# EAGLE library part DISP_7SEG (library dp_devices.v6)
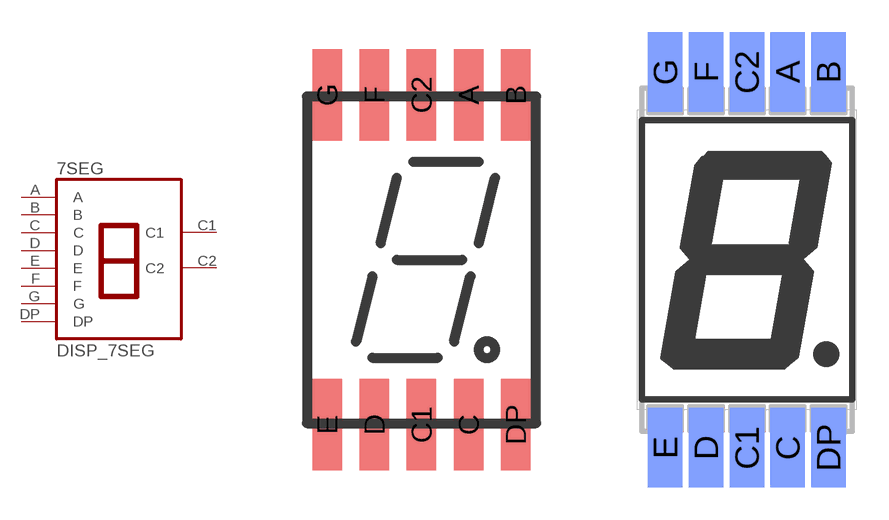
[diagram p17: symbol with the pads of DISP_7SEG; footprints DISP_7SEG, DISP_7SEG_KTS_4817CKR-P]

Designator prefix 7SEG

## DISP_7SEG  [DISP_7SEG]
A  A
B  B
C  C
C1  C1
C2  C2
D  D
DP  DP
E  E
F  F
G  G

## DISP_7SEG-10MM  [DISP_7SEG_KTS_4817CKR-P]
Pads as for DISP_7SEG

## Footprint DISP_7SEG (pad centres in mm)
smd 0.9 x 2.8: A 1.44,5.04; B 2.88,5.04; C 1.44,-5.04; C1 0,-5.04; C2 0,5.04; D -1.44,-5.04; DP 2.88,-5.04; E -2.88,-5.04; F -1.44,5.04; G -2.88,5.04

## Footprint DISP_7SEG_KTS_4817CKR-P (pad centres in mm)
smd 1.6 x 3.7 bottom: A 1.9,8.75; B 3.8,8.75; C 1.9,-8.75; C1 0,-8.75; C2 0,8.75; D -1.9,-8.75; DP 3.8,-8.75; E -3.8,-8.75; F -1.9,8.75; G -3.8,8.75